# Altium footprint library PcbLib1.PcbLib: 8 footprints
Each footprint in its own frame and in the unit in brackets; x right, y up, seen from the top. Pads: shape width x height; smd on the part's side, far side on the other; paste and mask are expansions set on the pad; w line width, h text height; cw(c..) or ccw(c..) is an arc to the next point about the centre after c.
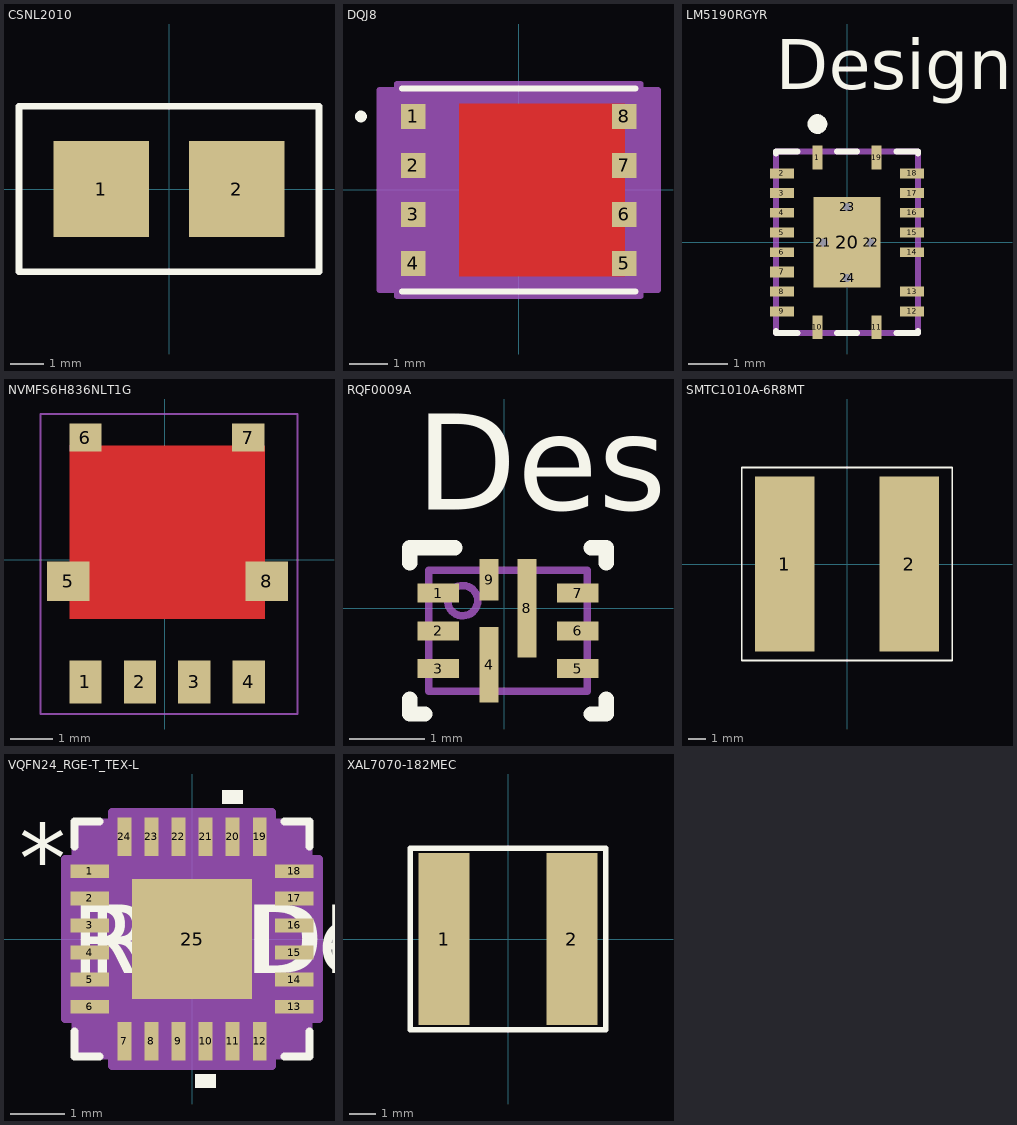
[diagram p0: the footprints below, top view; thin cyan lines are the x and y axes]

## CSNL2010 [mm]
pads (2):
  rect 2.89x2.92 smd: 1(-2.055,0) 2(2.055,0)
Top Overlay:
  lines w0.2: -4.54,-2.5 4.54,-2.5 4.54,2.5 -4.54,2.5 -4.54,0 -4.54,-2.5

## DQJ8 [mm]
pads (8):
  rect 0.63x0.65 smd paste-0.1 mask-0.33: 1(-2.735,1.905) 2(-2.735,0.635) 3(-2.735,-0.635) 4(-2.735,-1.905) 5(2.735,-1.905) 6(2.735,-0.635) 7(2.735,0.635) 8(2.735,1.905)
Top Layer:
  region: 2.745,0 2.745,-2.23 -1.545,-2.23 -1.545,0
  region: 2.745,0 2.745,2.23 -1.545,2.23 -1.545,0
Top Overlay:
  circle w0.152: c-4.091,1.905 r0.076
  lines w0.152: -3.027,-2.627 3.027,-2.627 ; -3.027,2.627 3.027,2.627
  text ".Designator" at -3.492,-0.635 h1.27
Top Paste:
  region: -0.18,-1.88 -0.18,-0.31 -1.415,-0.31 -1.415,-1.88
  region: -0.18,1.88 -0.18,0.31 -1.415,0.31 -1.415,1.88
  region: 0.32,1.88 0.32,0.31 1.905,0.31 1.905,1.88
  region: 0.32,-1.88 0.32,-0.31 1.905,-0.31 1.905,-1.88
Top Solder:
  region: 2.745,0 2.745,-2.23 -1.545,-2.23 -1.545,0
  region: 2.745,0 2.745,2.23 -1.545,2.23 -1.545,0
  region: 3.12,2.3 2.35,2.3 2.35,1.51 3.12,1.51
  region: 3.12,1.03 2.35,1.03 2.35,0.24 3.12,0.24
  region: 3.12,-0.24 2.35,-0.24 2.35,-1.03 3.12,-1.03
  region: 3.12,-1.51 2.35,-1.51 2.35,-2.3 3.12,-2.3
  region: -2.35,-1.51 -3.12,-1.51 -3.12,-2.3 -2.35,-2.3
  region: -2.35,-0.24 -3.12,-0.24 -3.12,-1.03 -2.35,-1.03
  region: -2.35,1.03 -3.12,1.03 -3.12,0.24 -2.35,0.24
  region: -2.35,2.3 -3.12,2.3 -3.12,1.51 -2.35,1.51
Mechanical 13:
  circle w0.025: c-2.725,1.905 r0.076
  lines w0.025: -0.305,2.5 ccw(c0,2.5) 0.305,2.5 ; -2.9,-2.5 -2.9,2.5 2.9,2.5 2.9,-2.5 -2.9,-2.5
  text ".Designator" at -3.492,-0.635 h1.27
Mechanical 15:
  region: -3.154,-2.591 -3.609,-2.591 -3.609,2.591 -3.154,2.591 -3.154,2.754 3.154,2.754 3.154,2.591 3.609,2.591 3.609,-2.591 3.154,-2.591 3.154,-2.754 -3.154,-2.754
  lines w0.152: -3.609,-2.591 -3.154,-2.591 -3.154,-2.754 3.154,-2.754 3.154,-2.591 3.609,-2.591 3.609,2.591 3.154,2.591 3.154,2.754 -3.154,2.754 -3.154,2.591 -3.609,2.591 -3.609,-2.591

## LM5190RGYR [mm]
pads (24):
  rect 0.25x0.6 smd paste+0 mask+0: 1(-0.75,2.15) 10(-0.75,-2.15) 11(0.75,-2.15) 19(0.75,2.15)
  rect 0.6x0.25 smd paste+0 mask+0: 2(-1.65,1.75) 3(-1.65,1.25) 4(-1.65,0.75) 5(-1.65,0.25) 6(-1.65,-0.25) 8(-1.65,-1.25) 9(-1.65,-1.75) 12(1.65,-1.75) 13(1.65,-1.25) 14(1.65,-0.25) 15(1.65,0.25) 16(1.65,0.75) 17(1.65,1.25) 18(1.65,1.75)
  rect 0.6x0.27 smd paste+0 mask+0: 7(-1.65,-0.75)
  rect 1.7x2.3 smd paste-1.137 mask+0: 20(0,0)
  round 0.5 hole 0.203 paste-2539.97 mask-0.241: 21(-0.6,0) 22(0.6,0) 23(0,0.9) 24(0,-0.9)
Top Overlay:
  circle w0.25: c-0.75,3 r0.125
  lines w0.15: -1.8,-2.25 -1.8,-2.3 -1.25,-2.3 ; -1.8,2.25 -1.8,2.3 -1.25,2.3 ; -0.25,-2.3 0.25,-2.3 ; -0.25,2.3 0.25,2.3 ; 1.25,-2.3 1.8,-2.3 1.8,-2.25 ; 1.25,2.3 1.8,2.3 1.8,2.25
  text ".Designator" at -3.492,-0.635 h1.27
  text "Designator67" at -1.803,3.886 h1.27
Top Paste:
  region: -0.775,-1.07 -0.775,-0.15 -0.725,-0.1 0.725,-0.1 0.775,-0.15 0.775,-1.07 0.725,-1.12 -0.725,-1.12
  region: -0.775,0.15 -0.775,1.07 -0.725,1.12 0.725,1.12 0.775,1.07 0.775,0.15 0.725,0.1 -0.725,0.1
Mechanical 13:
  lines w0.15: -1.8,-2.3 -1.8,2.3 1.8,2.3 1.8,-2.3 -1.8,-2.3
  text ".Designator" at -3.492,-0.635 h1.27

## NVMFS6H836NLT1G [mm] "Low-sid MOSFT"
height 6
pads (8):
  rect 0.75x1 smd: 1(-1.85,-2.85) 2(-0.58,-2.85) 3(0.69,-2.85) 4(1.96,-2.85)
  rect 1x0.92 smd: 5(-2.25,-0.5) 8(2.38,-0.5)
  rect 0.75x0.65 smd: 6(-1.85,2.85) 7(1.95,2.85)
Top Layer:
  rectangle: -2.225,-1.38 2.335,2.67
Mechanical 1:
  lines w0.05: -2.9,-3.6 3.1,-3.6 3.1,3.4 -2.9,3.4 -2.9,-3.6

## RQF0009A [mm]
pads (9):
  rect 0.55x0.25 smd paste+0 mask+0.051: 1(-0.875,0.2) 2(-0.875,-0.3) 3(-0.875,-0.8) 5(0.975,-0.8) 6(0.975,-0.3) 7(0.975,0.2)
  rect 0.25x1 smd paste+0 mask+0.051: 4(-0.2,-0.75)
  rect 0.25x1.3 smd paste+0 mask+0.051: 8(0.3,0)
  rect 0.25x0.55 smd paste+0 mask+0.051: 9(-0.2,0.375)
Top Overlay:
  lines w0.2: -1.25,-1.2 -1.25,-1.4 -1.05,-1.4 ; -1.25,0.6 -1.25,0.8 -0.65,0.8 ; 1.15,-1.4 1.35,-1.4 1.35,-1.2 ; 1.15,0.8 1.35,0.8 1.35,0.6
  text ".Designator" at -3.443,-0.935 h1.27
  text "Designator9" at -1.169,1.3 h1.27
Mechanical 13:
  circle w0.1: c-0.55,0.1 r0.2
  lines w0.1: -1,-1.1 -1,0.5 1.1,0.5 1.1,-1.1 -1,-1.1
  text ".Designator" at -3.443,-0.935 h1.27

## SMTC1010A-6R8MT [mm]
pads (2):
  rect 3.4x10 smd: 1(-3.55,0) 2(3.55,0)
Top Overlay:
  lines w0.1: -6,-5.5 6,-5.5 6,5.5 -6,5.5 -6,-5.5

## VQFN24_RGE-T_TEX-L [mil]
pads (25):
  rect 27.87x10.03 smd paste+0 mask+0: 1(-74.44,49.23) 2(-74.44,29.54) 3(-74.44,9.85) 4(-74.44,-9.85) 5(-74.44,-29.54) 6(-74.44,-49.23) 13(74.44,-49.23) 14(74.44,-29.54) 15(74.44,-9.85) 16(74.44,9.85) 17(74.44,29.54) 18(74.44,49.23)
  rect 10.03x27.87 smd paste+0 mask+0: 7(-49.23,-74.44) 8(-29.54,-74.44) 9(-9.85,-74.44) 10(9.85,-74.44) 11(29.54,-74.44) 12(49.23,-74.44) 19(49.23,74.44) 20(29.54,74.44) 21(9.85,74.44) 22(-9.85,74.44) 23(-29.54,74.44) 24(-49.23,74.44)
  rect 87x87 smd paste+0 mask+0: 25(0,0)
Top Overlay:
  region: 17.34,-98.37 2.35,-98.37 2.35,-108.37 17.34,-108.37
  region: 37.03,98.37 22.04,98.37 22.04,108.37 37.03,108.37
  lines w6: -85.5,-67.34 -85.5,-85.5 -67.34,-85.5 ; -85.5,67.34 -85.5,85.5 -67.34,85.5 ; 67.34,-85.5 85.5,-85.5 85.5,-67.34 ; 67.34,85.5 85.5,85.5 85.5,67.34
  text "*" at -125.87,34.07 h50
  text "RefDes" at -75,-25 h50
  text "REFDES" at -87.5,-25 h50
Mechanical 13:
  lines w1: -80.5,30.5 -30.5,80.5 ; -80.5,-80.5 80.5,-80.5 80.5,80.5 -80.5,80.5 -80.5,-80.5 ; -80.5,-55.23 -80.5,-43.23 -80.5,-55.23 ; -80.5,-35.53 -80.5,-23.54 -80.5,-35.53 ; -80.5,-15.85 -80.5,-3.85 -80.5,-15.85 ; -80.5,3.85 -80.5,15.85 -80.5,3.85 ; -80.5,23.54 -80.5,35.53 -80.5,23.54 ; -80.5,43.23 -80.5,55.23 -80.5,43.23 ; -55.23,-80.5 -43.23,-80.5 -55.23,-80.5 ; -55.23,80.5 -43.23,80.5 -55.23,80.5 ; -35.53,-80.5 -23.54,-80.5 -35.53,-80.5 ; -35.53,80.5 -23.54,80.5 -35.53,80.5 ; -15.85,-80.5 -3.85,-80.5 -15.85,-80.5 ; -15.85,80.5 -3.85,80.5 -15.85,80.5 ; 3.85,-80.5 15.85,-80.5 3.85,-80.5 ; 3.85,80.5 15.85,80.5 3.85,80.5 ; 23.54,-80.5 35.53,-80.5 23.54,-80.5 ; 23.54,80.5 35.53,80.5 23.54,80.5 ; 43.23,-80.5 55.23,-80.5 43.23,-80.5 ; 43.23,80.5 55.23,80.5 43.23,80.5 ; 80.5,-55.23 80.5,-43.23 80.5,-55.23 ; 80.5,-35.53 80.5,-23.54 80.5,-35.53 ; 80.5,-15.85 80.5,-3.85 80.5,-15.85 ; 80.5,3.85 80.5,15.85 80.5,3.85 ; 80.5,23.54 80.5,35.53 80.5,23.54 ; 80.5,43.23 80.5,55.23 80.5,43.23
  text "*" at -73,34.07 h50
  text "RefDes2" at -87.5,-25 h50
Mechanical 15:
  region: -58.24,-84.5 -84.5,-84.5 -84.5,-58.24 -92.37,-58.24 -92.37,58.24 -84.5,58.24 -84.5,84.5 -58.24,84.5 -58.24,92.37 58.24,92.37 58.24,84.5 84.5,84.5 84.5,58.24 92.37,58.24 92.37,-58.24 84.5,-58.24 84.5,-84.5 58.24,-84.5 58.24,-92.37 -58.24,-92.37
  lines w6: -92.37,-58.24 -84.5,-58.24 -84.5,-84.5 -58.24,-84.5 -58.24,-92.37 58.24,-92.37 58.24,-84.5 84.5,-84.5 84.5,-58.24 92.37,-58.24 92.37,58.24 84.5,58.24 84.5,84.5 58.24,84.5 58.24,92.37 -58.24,92.37 -58.24,84.5 -84.5,84.5 -84.5,58.24 -92.37,58.24 -92.37,-58.24
3D body "VQFN24_RGE-T_TEX.step": height 39.09, standoff 0, extent -80.51,-80.51 80.51,80.51

## XAL7070-182MEC [mm]
pads (2):
  rect 1.92x6.5 smd: 1(-2.41,0) 2(2.41,0)
Top Overlay:
  lines w0.2: -3.683,-3.429 -3.683,1.063 -3.683,3.429 3.683,3.429 3.683,-3.429 -3.683,-3.429